# Altium footprint library amirlib.PcbLib: 456 footprints (part 11 of 29)
Each footprint in its own frame and in the unit in brackets; x right, y up, seen from the top. Pads: shape width x height; smd on the part's side, far side on the other; paste and mask are expansions set on the pad; w line width, h text height; cw(c..) or ccw(c..) is an arc to the next point about the centre after c.
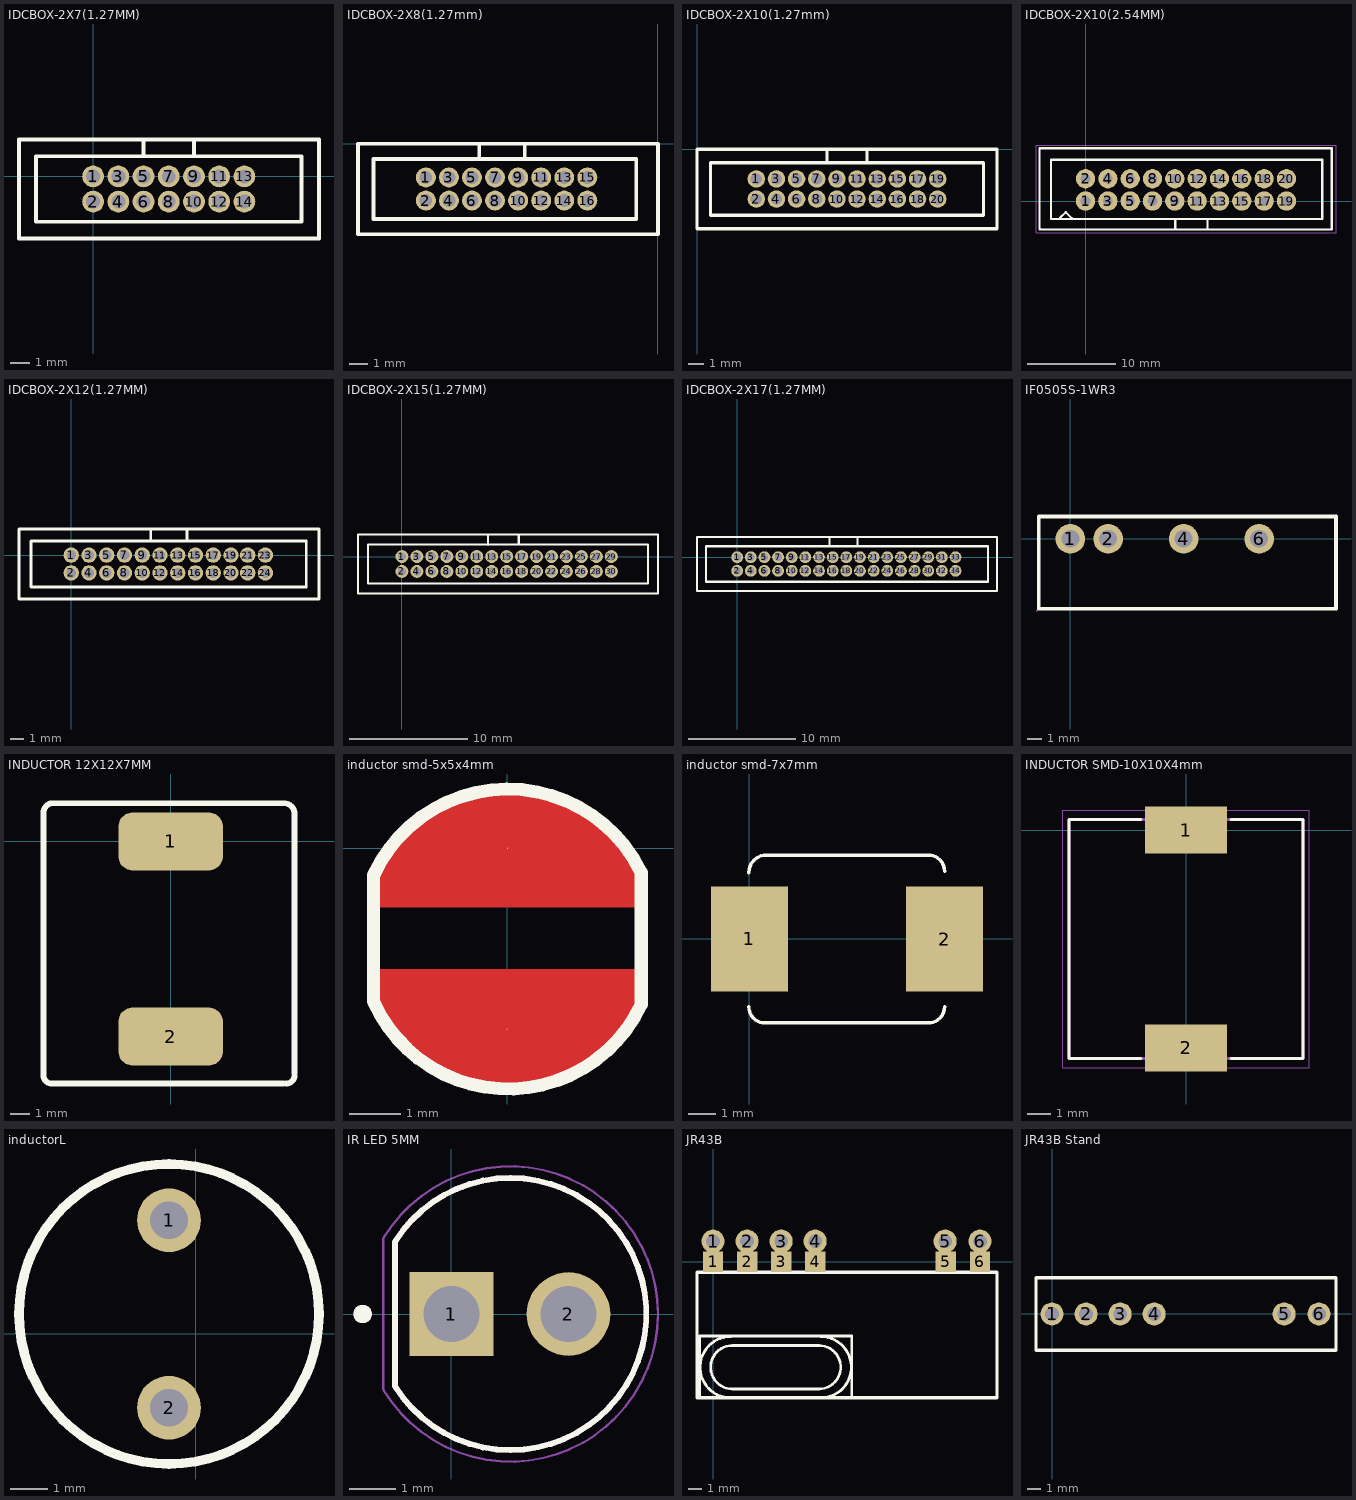
[diagram p10: the footprints below, top view; thin cyan lines are the x and y axes]

## IDCBOX-2X7(1.27MM) [mm]
pads (14):
  round 1.1 hole 0.7: 1(0,0) 2(0,-1.27) 3(1.27,0) 4(1.27,-1.27) 5(2.54,0) 6(2.54,-1.27) 7(3.81,0) 8(3.81,-1.27) 9(5.08,0) 10(5.08,-1.27) 11(6.35,0) 12(6.35,-1.27) 13(7.62,0) 14(7.62,-1.27)
Top Overlay:
  lines w0.2: 2.535,1.027 2.535,1.865 ; 5.085,1.067 5.085,1.865 ; -3.735,-3.135 -3.735,1.865 11.379,1.865 11.379,-3.135 -3.735,-3.135 ; -2.885,-2.285 10.49,-2.285 10.49,1.015 -2.885,1.015 -2.885,-2.285
3D body "62701421621.stp": height 4.95, standoff -2.35, extent -3.81,-3.135 11.43,1.915

## IDCBOX-2X8(1.27mm) [mm]
pads (16):
  round 1.1 hole 0.7: 1(-12.781,-1.865) 2(-12.781,-3.135) 3(-11.511,-1.865) 4(-11.511,-3.135) 5(-10.241,-1.865) 6(-10.241,-3.135) 7(-8.971,-1.865) 8(-8.971,-3.135) 9(-7.701,-1.865) 10(-7.701,-3.135) 11(-6.431,-1.865) 12(-6.431,-3.135) 13(-5.161,-1.865) 14(-5.161,-3.135) 15(-3.891,-1.865) 16(-3.891,-3.135)
Top Overlay:
  lines w0.2: -9.841,-0.845 -9.841,-0.007 ; -7.341,-0.806 -7.341,-0.007 ; -16.516,-5 0,-5 0,0 -16.516,0 -16.516,-5 ; -15.666,-4.15 -15.666,-0.85 -1.194,-0.85 -1.194,-4.15 -15.666,-4.15
3D body "62701621621.stp": height 5.45, standoff -1.85, extent -16.516,-5.025 -0.006,0.025

## IDCBOX-2X10(1.27mm) [mm]
pads (20):
  round 1.1 hole 0.7: 1(3.735,-1.865) 2(3.735,-3.135) 3(5.005,-1.865) 4(5.005,-3.135) 5(6.275,-1.865) 6(6.275,-3.135) 7(7.545,-1.865) 8(7.545,-3.135) 9(8.815,-1.865) 10(8.815,-3.135) 11(10.085,-1.865) 12(10.085,-3.135) 13(11.355,-1.865) 14(11.355,-3.135) 15(12.625,-1.865) 16(12.625,-3.135) 17(13.895,-1.865) 18(13.895,-3.135) 19(15.165,-1.865) 20(15.165,-3.135)
Top Overlay:
  lines w0.2: 8.2,-0.838 8.2,0 ; 10.7,-0.798 10.7,0 ; 0,-5 0,0 18.9,0 18.9,-5 0,-5 ; 0.85,-4.15 18.05,-4.15 18.05,-0.85 0.85,-0.85 0.85,-4.15
3D body "62702021621.stp": height 4.95, standoff -2.35, extent -0.125,-5 18.925,0.05

## IDCBOX-2X10(2.54MM) [mm]
pads (20):
  round 2.2 hole 1.1: 1(0,0) 2(0,2.54) 3(2.54,0) 4(2.54,2.54) 5(5.08,0) 6(5.08,2.54) 7(7.62,0) 8(7.62,2.54) 9(10.16,0) 10(10.16,2.54) 11(12.7,0) 12(12.7,2.54) 13(15.24,0) 14(15.24,2.54) 15(17.78,0) 16(17.78,2.54) 17(20.32,0) 18(20.32,2.54) 19(22.86,0) 20(22.86,2.54)
Top Overlay:
  lines w0.254: -2.896,-1.905 -2.261,-1.27 -1.575,-1.956 -1.575,-1.981 ; 1.981,-2.032 -3.937,-2.032 -3.937,4.7 26.933,4.7 26.933,-2.007 ; 2.007,-2.032 5.664,-2.032 ; 5.664,-3.226 6.477,-3.226 ; 5.69,-2.032 26.933,-2.032 ; 10.207,-3.226 10.207,-2.032 ; 13.864,-3.226 13.864,-2.032 ; -5.232,-3.226 28.025,-3.226 28.025,6 -5.232,6 -5.232,-3.226
Mechanical 15:
  region: -5.009,-3.142 -5.009,-3.167 -5.044,-3.202 -5.094,-3.202 -5.129,-3.167 -5.129,-3.142 -5.129,-3.118 -5.094,-3.082 -5.044,-3.082 -5.009,-3.118
  lines w0.051: -5.639,-3.581 28.5,-3.581 28.5,6.325 -5.639,6.325 -5.639,-3.581
3D body "61202021621.stp": height 9.13, standoff -2.98, extent -5.13,-3.125 27.93,6.048

## IDCBOX-2X12(1.27MM) [mm]
pads (24):
  round 1.1 hole 0.7: 1(0,0) 2(0,-1.27) 3(1.27,0) 4(1.27,-1.27) 5(2.54,0) 6(2.54,-1.27) 7(3.81,0) 8(3.81,-1.27) 9(5.08,0) 10(5.08,-1.27) 11(6.35,0) 12(6.35,-1.27) 13(7.62,0) 14(7.62,-1.27) 15(8.89,0) 16(8.89,-1.27) 17(10.16,0) 18(10.16,-1.27) 19(11.43,0) 20(11.43,-1.27) 21(12.624,0) 22(12.624,-1.27) 23(13.894,0) 24(13.894,-1.27)
Top Overlay:
  lines w0.2: 5.684,1.027 5.684,1.865 ; 8.286,1.067 8.286,1.854 ; -3.735,-3.135 -3.735,1.865 17.729,1.865 17.729,-3.135 -3.735,-3.135 ; -2.885,-2.285 16.815,-2.285 16.815,1.015 -2.885,1.015 -2.885,-2.285
3D body "62702421621.stp": height 4.95, standoff -2.35, extent -3.81,-3.094 17.78,1.956

## IDCBOX-2X15(1.27MM) [mm]
pads (30):
  round 1.1 hole 0.7: 1(0,0) 2(0,-1.27) 3(1.27,0) 4(1.27,-1.27) 5(2.54,0) 6(2.54,-1.27) 7(3.81,0) 8(3.81,-1.27) 9(5.08,0) 10(5.08,-1.27) 11(6.35,0) 12(6.35,-1.27) 13(7.62,0) 14(7.62,-1.27) 15(8.89,0) 16(8.89,-1.27) 17(10.16,0) 18(10.16,-1.27) 19(11.43,0) 20(11.43,-1.27) 21(12.7,0) 22(12.7,-1.27) 23(13.97,0) 24(13.97,-1.27) 25(15.24,0) 26(15.24,-1.27) 27(16.51,0) 28(16.51,-1.27) 29(17.78,0) 30(17.78,-1.27)
Top Overlay:
  lines w0.2: 7.304,1.014 7.304,1.852 ; 9.906,1.054 9.906,1.841 ; -3.735,-3.135 -3.735,1.865 21.742,1.865 21.742,-3.135 -3.735,-3.135 ; -2.885,-2.285 -2.885,1.015 20.892,1.015 20.892,-2.285 -2.885,-2.285
3D body "62703021621.stp": height 4.95, standoff -2.35, extent -3.734,-3.125 21.666,1.925

## IDCBOX-2X17(1.27MM) [mm]
pads (34):
  round 1.1 hole 0.7: 1(0,0) 2(0,-1.27) 3(1.27,0) 4(1.27,-1.27) 5(2.54,0) 6(2.54,-1.27) 7(3.81,0) 8(3.81,-1.27) 9(5.08,0) 10(5.08,-1.27) 11(6.35,0) 12(6.35,-1.27) 13(7.62,0) 14(7.62,-1.27) 15(8.89,0) 16(8.89,-1.27) 17(10.16,0) 18(10.16,-1.27) 19(11.43,0) 20(11.43,-1.27) 21(12.7,0) 22(12.7,-1.27) 23(13.97,0) 24(13.97,-1.27) 25(15.24,0) 26(15.24,-1.27) 27(16.51,0) 28(16.51,-1.27) 29(17.78,0) 30(17.78,-1.27) 31(19.05,0) 32(19.05,-1.27) 33(20.32,0) 34(20.32,-1.27)
Top Overlay:
  lines w0.2: 8.585,1.029 8.585,1.867 ; 11.187,1.069 11.187,1.856 ; -3.735,-3.135 24.181,-3.135 24.181,1.865 -3.735,1.865 -3.735,-3.135 ; -2.885,-2.285 23.331,-2.285 23.331,1.015 -2.885,1.015 -2.885,-2.285
3D body "62703421621.stp": height 4.95, standoff -2.35, extent -3.81,-3.11 24.13,1.94

## IF0505S-1WR3 [mm]
pads (4):
  round 1.999 hole 1.199: 1(0,0) 2(2.54,0) 4(7.62,0) 6(12.7,0)
Top Overlay:
  lines w0.254: -2.129,-4.699 -2.129,1.501 17.871,1.501 17.871,-4.699 -2.129,-4.699
Mechanical 8:
  region: -2.197,-4.826 -2.207,-4.859 -2.233,-4.882 -2.266,-4.887 -2.296,-4.872 -2.314,-4.844 -2.314,-4.811 -2.296,-4.783 -2.266,-4.768 -2.233,-4.773 -2.207,-4.796
3D body "IF0505S-1WR3_Altium_RealSize.step": height 10.16, standoff -3.5, extent -2.307,-4.981 17.343,1.019

## INDUCTOR 12X12X7MM [mm]
pads (2):
  rrect50% 5.4x3 smd: 1(0,0) 2(0,-10.047)
Top Overlay:
  lines w0.3: -6.55,1.428 -6.55,-12.047 ccw(c-6.125,-12.047) -6.125,-12.472 5.816,-12.472 ; -6.55,1.453 -6.55,1.478 cw(c-6.057,1.478) -6.057,1.971 -0.118,1.971 5.832,1.971 cw(c5.832,1.428) 6.375,1.428 6.375,-11.918 ; 5.95,-12.472 ccw(c5.95,-12.047) 6.375,-12.047
3D body "CDRH127_LDNP-150MC.STEP": height 8, standoff 0, extent -6.127,-11.055 5.873,0.945

## inductor smd-5x5x4mm [mil]
pads (2):
  round 1 smd: 1(0,0) 2(0,-138.29)
Top Layer:
  region: -102.36,-45.28 -102.36,-20.67 -100.46,-16.51 -95.98,-8.54 -90.88,-0.95 -85.18,6.2 -78.93,12.87 -72.16,19.02 -64.91,24.59 -57.23,29.57 -49.19,33.9 -40.81,37.58 -32.17,40.56 -23.31,42.84 -14.3,44.4 -5.2,45.23 3.95,45.31 13.07,44.66 22.11,43.28 31,41.17 39.7,38.35 48.15,34.84 56.28,30.66 64.04,25.83 71.4,20.4 78.29,14.38 84.67,7.84 90.5,0.79 95.75,-6.7 100.38,-14.58 102.36,-18.7 102.36,-45.28
  region: -102.36,-117.13 -100.5,-121.33 -96.1,-129.39 -91.07,-137.07 -85.42,-144.32 -79.2,-151.08 -72.45,-157.31 -65.21,-162.97 -57.54,-168.03 -49.48,-172.44 -41.09,-176.18 -32.43,-179.22 -23.54,-181.55 -14.49,-183.14 -5.35,-184 3.84,-184.1 13,-183.46 22.09,-182.07 31.02,-179.95 39.76,-177.1 48.23,-173.56 56.39,-169.33 64.17,-164.45 71.54,-158.96 78.43,-152.88 84.8,-146.27 90.61,-139.15 95.82,-131.59 100.4,-123.63 102.36,-119.47 102.36,-92.52 -102.36,-92.52
Top Overlay:
  lines w10: -102.36,-117.13 ccw(c0.54,-71.49) 102.36,-119.47 102.36,-92.52 102.36,-45.28 102.36,-18.7 ccw(c0.46,-67.86) -102.36,-20.67 -102.36,-45.28 -102.36,-92.52 -102.36,-117.13
3D body: height 157.48, standoff 0, extent -102.36,-184.14 102.36,45.35

## inductor smd-7x7mm [mil]
pads (2):
  rect 110x150 smd: 1(0,0) 2(279.09,-0.06)
Top Overlay:
  lines w5: -0.91,-97.06 ccw(c22.09,-97.06) 22.09,-120.06 256.09,-120.06 ccw(c256.09,-97.06) 279.09,-97.06 ; -0.91,94.94 cw(c24.09,94.94) 24.09,119.94 256.09,119.94 cw(c256.09,96.94) 279.09,96.94
3D body: height 157.48, standoff 0, extent -0.91,-120.06 279.09,119.94

## INDUCTOR SMD-10X10X4mm [mm]
pads (2):
  rect 3.5x2 smd: 1(0,0) 2(0,-9.3)
Top Overlay:
  lines w0.127: -1.92,-9.75 -5,-9.75 -5,0.45 -1.92,0.45 ; 1.92,-9.75 5,-9.75 5,0.45 1.92,0.45
Mechanical 13:
  lines w0.127: -5,-9.75 -5,0.45 5,0.45 5,-9.75 -5,-9.75
Mechanical 15:
  lines w0.05: -5.25,-10.15 5.25,-10.15 5.25,0.85 -5.25,0.85 -5.25,-10.15
3D body "User Library-cdrh104r.STEP": height 4, standoff 0, extent -5.207,-9.9 5.093,0.6

## inductorL [mm]
pads (2):
  round 1.7 hole 1: 1(-0.711,3.024) 2(-0.711,-1.976)
Top Overlay:
  circle w0.254: c-0.711,0.524 r4
3D body "744772100.stp": height 9.53, standoff -4.97, extent -6.227,-4.992 4.804,6.039

## IR LED 5MM [mm]
pads (2):
  rect 1.815x1.815 hole 1.21: 1(0,0)
  round 1.815 hole 1.21: 2(2.54,0)
Top Overlay:
  circle w0.2: c-1.93,0 r0.1
  lines w0.127: -1.23,-1.566 ccw(c1.276,0) -1.23,1.566 -1.23,-1.566
Mechanical 13:
  circle w0.2: c-1.93,0 r0.1
  lines w0.127: -1.23,-1.566 ccw(c1.276,0) -1.23,1.566 -1.23,-1.566
Mechanical 15:
  lines w0.05: -1.48,-1.64 -1.48,1.64 ; -1.473,-1.652 ccw(c1.277,0) -1.473,1.652
3D body "step_temp.STEP": height 9.1, standoff -17.8, extent -1.33,-2.95 4.22,2.95

## JR43B [mm]
pads (12):
  rect 1.5x1.5 smd: 1(0,0) 2(2.5,0) 3(5,0) 4(7.5,0) 5(17.1,0) 6(19.6,0)
  round 1.7 hole 1 mask+0.2: 1(0,1.5) 2(2.5,1.5) 3(5,1.5) 4(7.5,1.5) 5(17.043,1.5) 6(19.6,1.5)
Top Overlay:
  lines w0.2: 1.298,-10 cw(c1.298,-7.75) 1.298,-5.5 ; 1.4,-9.35 7.8,-9.35 ; 1.4,-6.15 7.8,-6.15 ; 1.425,-9.35 cw(c1.425,-7.75) 1.425,-6.15 ; 7.775,-9.35 ccw(c7.775,-7.75) 7.775,-6.15 ; 7.902,-10 ccw(c7.902,-7.75) 7.902,-5.5 ; -0.988,-10.036 -0.988,-5.464 10.188,-5.464 10.188,-10.036 -0.988,-10.036
  lines w0.254: -1.175,-9.975 -1.175,-0.775 20.85,-0.775 20.85,-9.975 -1.175,-9.975
3D body "HC-49_LT_THT_16MHz.step": height 5.1, standoff -0.49, extent -1.075,-10.075 10.275,-5.425

## JR43B Stand [mm]
pads (6):
  round 1.7 hole 1 mask+0.2: 1(0,0) 2(2.5,0) 3(5,0) 4(7.5,0) 5(17.043,0) 6(19.6,0)
Top Overlay:
  lines w0.254: -1.175,-2.651 20.85,-2.651 20.85,2.649 -1.175,2.649 -1.175,-2.651
3D body: height 10, standoff 0, extent -1.175,-0.925 20.85,1.05